# Altium schematic symbol library Ic%.SchLib: 452 symbols (part 11 of 12)
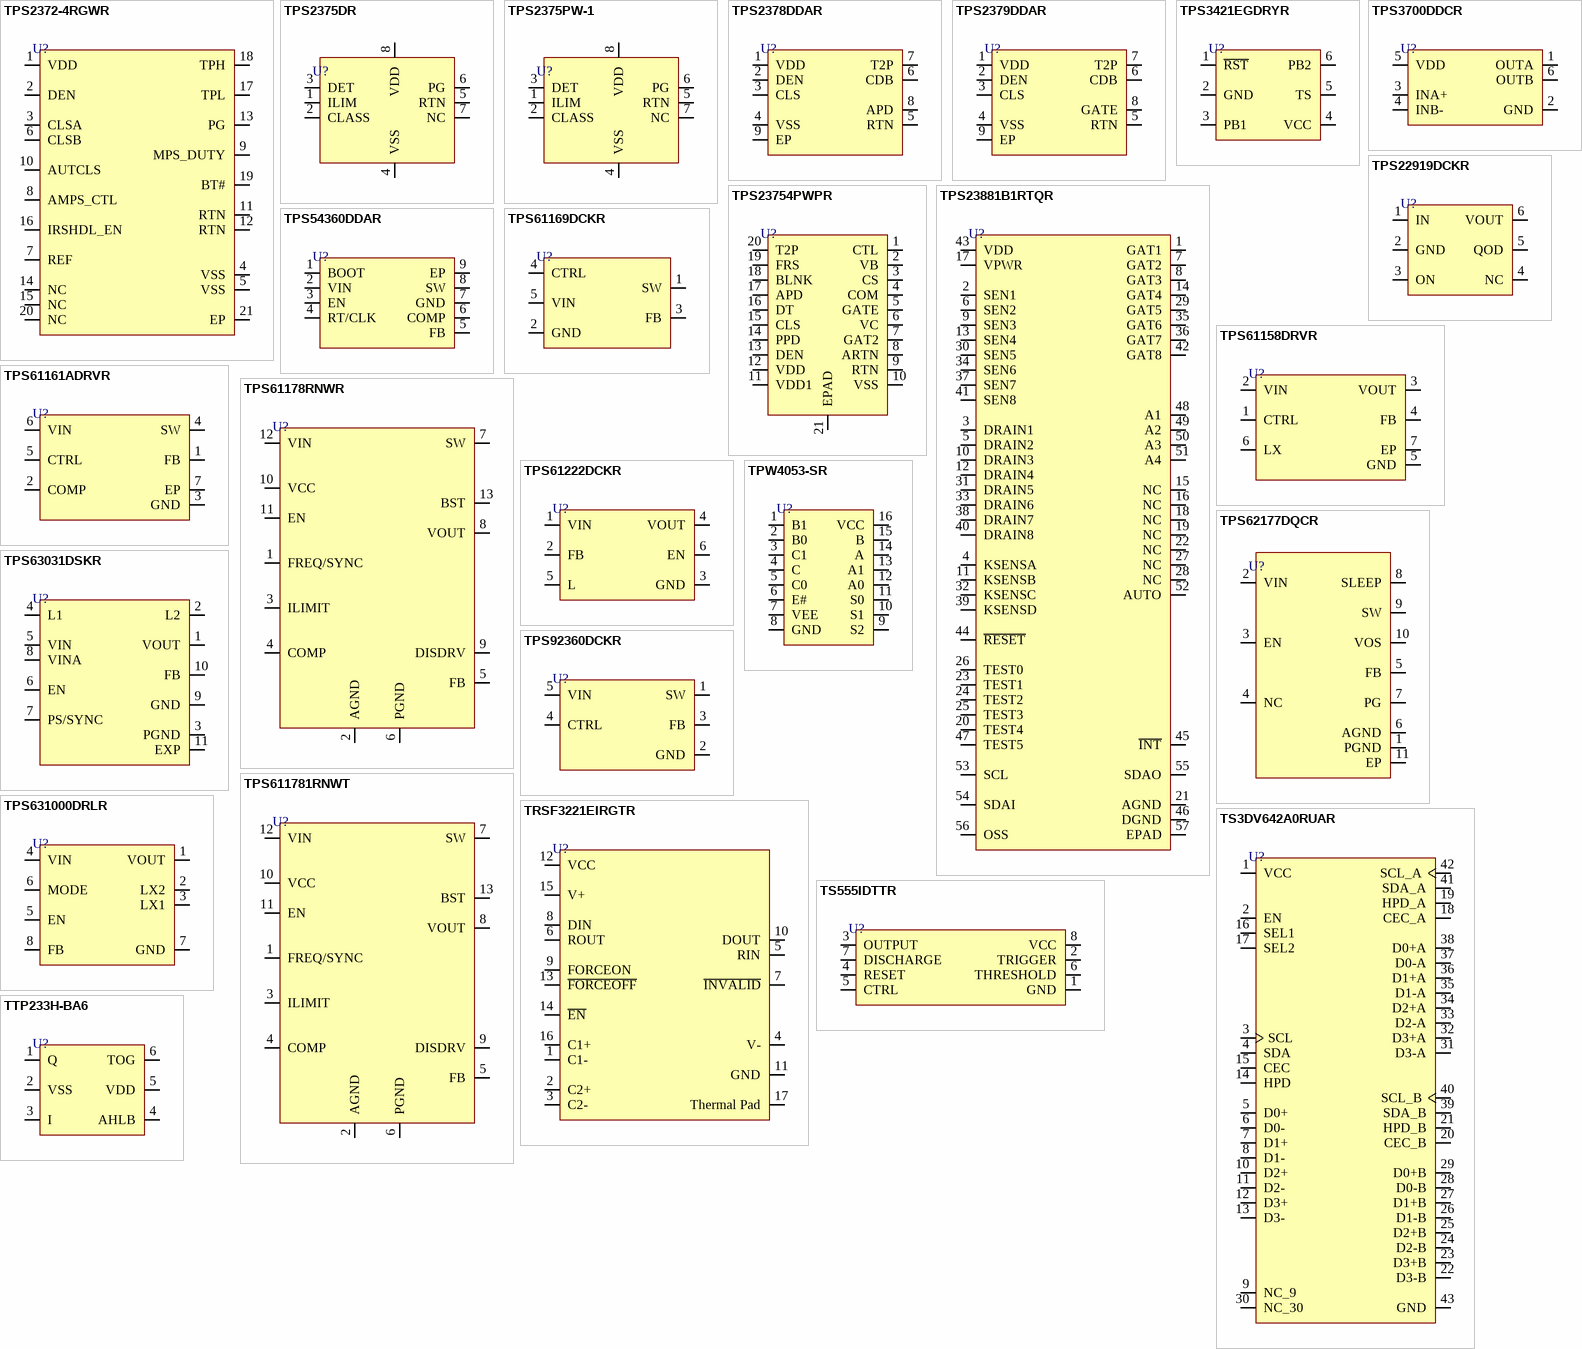
[diagram p33: symbols TPS2372-4RGWR to TTP233H-BA6]

## TPS61178RNWR
designator U?
ICLEDDRVRDCREG13QFN; Manufacturer: Texas Instruments; Manufacturer Part Number: TPS61178RNWR; Item Type: IC; Supplier: Mouser; LCSC Part Number: C127918; RoHS: Yes; Stock: 3098; Pricing: 1=3.28, 10=2.79, 50=2.79, 100=2.37, 1000=2.14, 10000=1.12 (USD); ComponentLink1URL: http://www.ti.com/general/docs/suppproductinfo.tsp?distId=10&amp;gotoUrl=http%3A%2F%2Fwww.ti.com%2Flit%2Fgpn%2Ftps61178&src-supplier=Digikey; ComponentLink1Description: http://www.ti.com/general/docs/suppproductinfo.tsp?distId=10&amp;gotoUrl=http%3A%2F%2Fwww.ti.com%2Flit%2Fgpn%2Ftps61178&src-supplier=Digikey; ComponentLink2URL: http://www.ti.com/lit/ds/symlink/tps61178.pdf?src-supplier=Digikey; ComponentLink2Description: http://www.ti.com/lit/ds/symlink/tps61178.pdf?src-supplier=Digikey
footprint VQFN-13-HR(3x3.5)
pins: 1 FREQ/SYNC, 2 AGND, 3 ILIMIT, 4 COMP, 5 FB, 6 PGND, 7 SW, 8 VOUT, 9 DISDRV, 10 VCC, 11 EN, 12 VIN, 13 BST

## TPS61222DCKR
designator U?
IC REG BOOST 5V 200MA SC70-6; Manufacturer: Texas Instruments; Manufacturer Part Number: TPS61222DCKR; Supplier: Mouser; LCSC Part Number: C116461; RoHS: Yes; Item Type: IC; Stock: 20831; Pricing: 1=1.08, 10=0.78, 50=0.705, 100=0.622, 1000=0.515, 10000=0.476 (USD); ComponentLink1URL: https://datasheet.ciiva.com/2034/tps61220-2034085.pdf?src-supplier=Digikey; ComponentLink1Description: https://datasheet.ciiva.com/2034/tps61220-2034085.pdf?src-supplier=Digikey; ComponentLink2URL: https://datasheet.ciiva.com/14376/tps61222-14376997.pdf?src-supplier=Avnet; ComponentLink2Description: https://datasheet.ciiva.com/14376/tps61222-14376997.pdf?src-supplier=Avnet
footprint SC-70-6
pins: 1 VIN, 2 FB, 3 GND, 4 VOUT, 5 L, 6 EN

## TPS62177DQCR
designator U?
IC REG BUCK 3.3V 500MA 10WSON; Manufacturer: Texas Instruments; Manufacturer Part Number: TPS62177DQCR; Supplier: Mouser; LCSC Part Number: C91241; RoHS: Yes; Item Type: IC; Stock: 441; Pricing: 1=1.38, 10=1.01, 50=0.912, 100=0.808, 1000=0.674, 10000=0.628 (USD); ComponentLink1URL: https://datasheet.ciiva.com/12225/slvsb35-213378-12225446.pdf?src-supplier=Mouser; ComponentLink1Description: https://datasheet.ciiva.com/12225/slvsb35-213378-12225446.pdf?src-supplier=Mouser; ComponentLink2URL: https://datasheet.ciiva.com/15082/tps62177-15082070.pdf?src-supplier=Digikey; ComponentLink2Description: https://datasheet.ciiva.com/15082/tps62177-15082070.pdf?src-supplier=Digikey
footprint 10-WSON (3x2)
pins: 1 PGND, 2 VIN, 3 EN, 4 NC, 5 FB, 6 AGND, 7 PG, 8 SLEEP, 9 SW, 10 VOS, 11 EP

## TPS63031DSKR
designator U?
IC REG BUCK BST 3.3V 900MA 10SON; Manufacturer: Texas Instruments; Manufacturer Part Number: TPS63031DSKR; Supplier: Mouser; LCSC Part Number: C15516; RoHS: Yes; Item Type: IC; Stock: 43441; Pricing: 1=2.33, 10=1.64, 50=1.64, 100=1.35, 1000=0.965, 10000=0.917 (USD); ComponentLink1URL: https://datasheet.ciiva.com/2034/tps63030-2034702.pdf?src-supplier=Digikey; ComponentLink1Description: https://datasheet.ciiva.com/2034/tps63030-2034702.pdf?src-supplier=Digikey; ComponentLink2URL: https://datasheet.ciiva.com/3221/tps63030-3221513.pdf?src-supplier=Avnet; ComponentLink2Description: https://datasheet.ciiva.com/3221/tps63030-3221513.pdf?src-supplier=Avnet
footprint 10-SON (2.5x2.5)
pins: 1 VOUT, 2 L2, 3 PGND, 4 L1, 5 VIN, 6 EN, 7 PS/SYNC, 8 VINA, 9 GND, 10 FB, 11 EXP

## TPS92360DCKR
designator U?
IC LED DRV RGLTR PWM 1.2A SC70-5; Manufacturer: Texas Instruments; Manufacturer Part Number: TPS92360DCKR; Supplier: Digikey; LCSC Part Number: C2928788; RoHS: No; Item Type: IC; Stock: 4572; Pricing: 1=0.91, 10=0.817, 25=0.7748, 100=0.6366, 250=0.59508, 500=0.52588, 1000=0.41517 (USD)
footprint SC70-5
pins: 1 SW, 2 GND, 3 FB, 4 CTRL, 5 VIN

## TPS611781RNWT
designator U?
20-V, 10-A fully integrated sync boost with load disconnect 13-VQFN-HR -40 to 85; Manufacturer: Texas Instruments; Manufacturer Part Number: TPS611781RNWT; Supplier: Digikey; Supplier Part Number: 296-46568-1-ND; RoHS: Yes; Category: Voltage Regulators - Switching; Stock: 351; Pricing: 1=5.66, 10=5.084, 25=4.8064, 100=4.1655 (USD); ComponentLink1URL: http://www.ti.com/lit/ds/symlink/tps61178.pdf?src-supplier=Digikey; ComponentLink1Description: http://www.ti.com/lit/ds/symlink/tps61178.pdf?src-supplier=Digikey
footprint VQFN-13-HR(3x3.5)
pins: 1 FREQ/SYNC, 2 AGND, 3 ILIMIT, 4 COMP, 5 FB, 6 PGND, 7 SW, 8 VOUT, 9 DISDRV, 10 VCC, 11 EN, 12 VIN, 13 BST

## TPS631000DRLR
designator U?
Non-Isolated PoL Module DC DC Converter 1 Output 1.2 ~ 5.3V 2A 1.6V - 5.5V Input; Manufacturer: Texas Instruments; Manufacturer Part Number: TPS631000DRLR; Item Type: IC; Topology: 6153TopologyType; Supplier: Mouser; LCSC Part Number: C5219190; RoHS: No; Stock: 19488; Pricing: 1=1.49, 10=1.34, 50=1.34, 100=1.08, 1000=0.733, 10000=0.631 (USD); Pins: 8NUMBER; Length: 2.1mm; Width: 1.2mm; Height: 600um; Thickness: 550um
footprint SOT-583
pins: 1 VOUT, 2 LX2, 3 LX1, 4 VIN, 5 EN, 6 MODE, 7 GND, 8 FB

## TPW4053-SR
designator U?
ANALOG SWITCH 3X SPDT (SINGLEPOL; Manufacturer: 3PEAK; Manufacturer Part Number: TPW4053-SR; Item Type: IC; Supplier: DigiKey; LCSC Part Number: C7500846; RoHS: No; Stock: 2500
footprint SOIC-16
pins: 1 B1, 2 B0, 3 C1, 4 C, 5 C0, 6 E#, 7 VEE, 8 GND, 9 S2, 10 S1, 11 S0, 12 A0, 13 A1, 14 A, 15 B, 16 VCC

## TRSF3221EIRGTR
designator U?
IC TRANSCEIVER FULL 1/1 16VQFN; Manufacturer: Texas Instruments; Manufacturer Part Number: TRSF3221EIRGTR; Supplier: Mouser; LCSC Part Number: C2861230; RoHS: No; Item Type: IC; Stock: 8746; Pricing: 1=2.41, 10=1.64, 50=1.64, 100=1.47, 1000=1.3, 10000=1.24 (USD)
footprint 16-QFN (3x3).
pins: 1 C1-, 2 C2+, 3 C2-, 4 V-, 5 RIN, 6 ROUT, 7 ~{INVALID}, 8 DIN, 9 FORCEON, 10 DOUT, 11 GND, 12 VCC, 13 ~{FORCEOFF}, 14 ~{EN}, 15 V+, 16 C1+, 17 Thermal Pad

## TS3DV642A0RUAR
designator U?
IC MUX/DEMUX 12 X 2:1 42WQFN; Manufacturer: Texas Instruments; Manufacturer Part Number: TS3DV642A0RUAR; Value: 10.5R; Supplier: Mouser; LCSC Part Number: C157482; RoHS: Yes; Item Type: IC; Stock: 15823; Pricing: 1=1.57, 10=1.41, 50=1.41, 100=1.13, 1000=0.773, 10000=0.666 (USD); Length: 9mm; Width: 3.5mm; Height: 800um; Thickness: 750um; ComponentLink1URL: https://datasheet.ciiva.com/30004/ts3dv642-30004934.pdf?src-supplier=Avnet; ComponentLink1Description: https://datasheet.ciiva.com/30004/ts3dv642-30004934.pdf?src-supplier=Avnet; ComponentLink2URL: https://datasheet.ciiva.com/18576/ts3dv642-18576654.pdf?src-supplier=Digikey; ComponentLink2Description: https://datasheet.ciiva.com/18576/ts3dv642-18576654.pdf?src-supplier=Digikey
footprint 42-WQFN (3.5x9)
pins: 1 VCC, 2 EN, 3 SCL, 4 SDA, 5 D0+, 6 D0-, 7 D1+, 8 D1-, 9 NC_9, 10 D2+, 11 D2-, 12 D3+, 13 D3-, 14 HPD, 15 CEC, 16 SEL1, 17 SEL2, 18 CEC_A, 19 HPD_A, 20 CEC_B, 21 HPD_B, 22 D3-B, 23 D3+B, 24 D2-B, 25 D2+B, 26 D1-B, 27 D1+B, 28 D0-B, 29 D0+B, 30 NC_30, 31 D3-A, 32 D3+A, 33 D2-A, 34 D2+A, 35 D1-A, 36 D1+A, 37 D0-A, 38 D0+A, 39 SDA_B, 40 SCL_B, 41 SDA_A, 42 SCL_A, 43 GND

## TS555IDTTR
designator U?
IC OSC SINGLE TIMER 2.7MHZ 8SOIC; Manufacturer: STMicroelectronics; Manufacturer Part Number: TS555IDTTR; Max Supply Voltage: 16V; Min Supply Voltage: 2V; Number of Channels: 1NUMBER; Propagation Delay: 100ns; Supplier: Future Electronics; LCSC Part Number: C880084; RoHS: Yes; Item Type: IC; Stock: 50000; Pricing: 2500=0.36, 5000=0.355, 7500=0.35, 12500=0.345, 25000=0.335 (USD); Height: 1.75mm; ComponentLink1URL: http://www.farnell.com/datasheets/1947266.pdf?src-supplier=Farnell; ComponentLink1Description: http://www.farnell.com/datasheets/1947266.pdf?src-supplier=Farnell; ComponentLink2URL: http://www.farnell.com/datasheets/1947266.pdf?src-supplier=Element14; ComponentLink2Description: http://www.farnell.com/datasheets/1947266.pdf?src-supplier=Element14; ComponentLink3URL: http://www.farnell.com/datasheets/1947266.pdf?src-supplier=Newark; ComponentLink3Description: http://www.farnell.com/datasheets/1947266.pdf?src-supplier=Newark; ComponentLink4URL: http://www.st.com/content/ccc/resource/technical/document/datasheet/45/d5/c6/11/46/d3/4b/a3/CD00000893.pdf/files/CD00000893.pdf/jcr:content/translations/en.CD00000893.pdf?src-supplier=Digikey; ComponentLink4Description: http://www.st.com/content/ccc/resource/technical/document/datasheet/45/d5/c6/11/46/d3/4b/a3/CD00000893.pdf/files/CD00000893.pdf/jcr:content/translations/en.CD00000893.pdf?src-supplier=Digikey; ComponentLink5URL: http://www.st.com/st-web-ui/static/active/en/resource/technical/document/datasheet/CD00000893.pdf?src-supplier=Avnet; ComponentLink5Description: http://www.st.com/st-web-ui/static/active/en/resource/technical/document/datasheet/CD00000893.pdf?src-supplier=Avnet; ComponentLink6URL: https://datasheet.octopart.com/TS555IDTTR-STMicroelectronics-datasheet-45197658.pdf?src-supplier=TME; ComponentLink6Description: https://datasheet.octopart.com/TS555IDTTR-STMicroelectronics-datasheet-45197658.pdf?src-supplier=TME
footprint SOIC-8(0.154", 3.90mm Width)
pins: 1 GND, 2 TRIGGER, 3 OUTPUT, 4 RESET, 5 CTRL, 6 THRESHOLD, 7 DISCHARGE, 8 VCC

## TTP233H-BA6
designator U?
SOT-23-6L Touch Sensors ROHS; Manufacturer: Tontek Design Tech; Manufacturer Part Number: TTP233H-BA6; Item Type: IC; Package: SOT-23-6L; LCSC Part Number: C2890349; ComponentLink1Description: LCSC; ComponentLink1URL: https://www.lcsc.com/product-detail/Touch-Sensors_Tontek-Design-Tech-TTP233H-BA6_C2890349.html
footprint SOT-23-6
pins: 1 Q, 2 VSS, 3 I, 4 AHLB, 5 VDD, 6 TOG

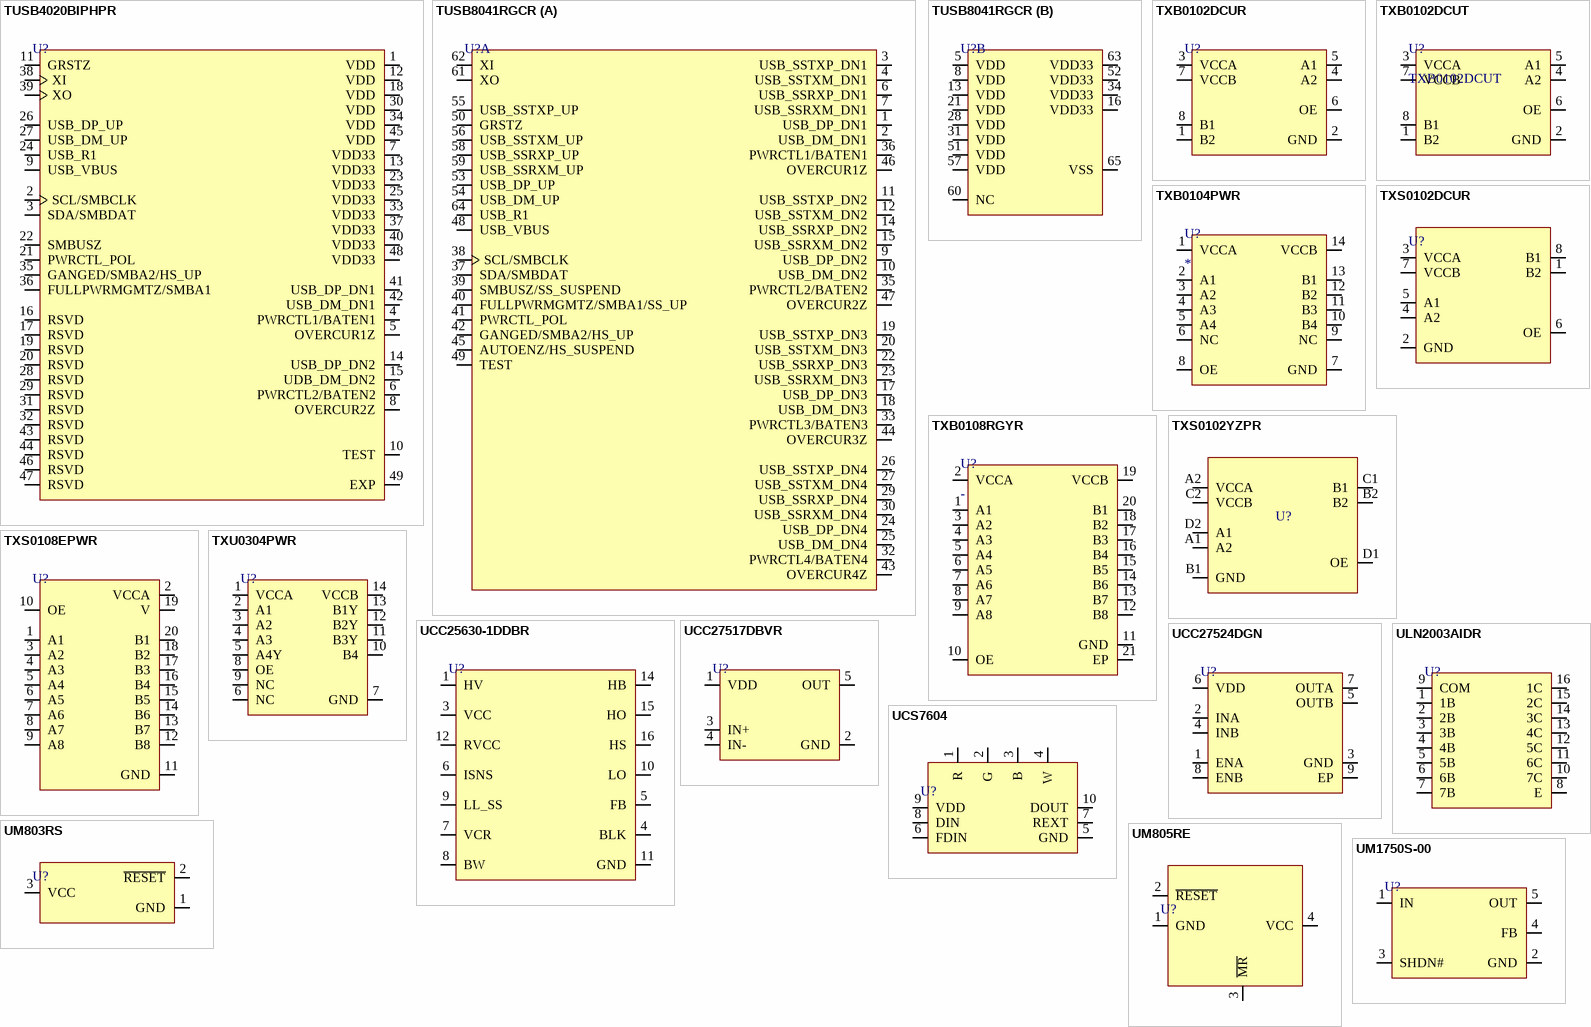
[diagram p21: symbols TUSB4020BIPHPR to UM1750S-00]

## TUSB4020BIPHPR
designator U?
IC USB 2.0 2PORT HUB IND 48HTQFP; Manufacturer: Texas Instruments; Manufacturer Part Number: TUSB4020BIPHPR; Supplier: Mouser; LCSC Part Number: C2864320; RoHS: Yes; Item Type: IC; Stock: 2703; Pricing: 1=4.5, 10=3.15, 50=3.15, 100=2.85, 1000=2.55, 10000=2.52 (USD); ComponentLink1URL: http://www.ti.com/lit/ds/symlink/tusb4020bi.pdf?src-supplier=Digikey; ComponentLink1Description: http://www.ti.com/lit/ds/symlink/tusb4020bi.pdf?src-supplier=Digikey; ComponentLink2URL: http://www.ti.com/general/docs/suppproductinfo.tsp?distId=10&amp;gotoUrl=http%3A%2F%2Fwww.ti.com%2Flit%2Fgpn%2Ftusb4020bi&src-supplier=Digikey; ComponentLink2Description: http://www.ti.com/general/docs/suppproductinfo.tsp?distId=10&amp;gotoUrl=http%3A%2F%2Fwww.ti.com%2Flit%2Fgpn%2Ftusb4020bi&src-supplier=Digikey
footprint 48-HTQFP (7x7)
pins: 1 VDD, 2 SCL/SMBCLK, 3 SDA/SMBDAT, 4 PWRCTL1/BATEN1, 5 OVERCUR1Z, 6 PWRCTL2/BATEN2, 7 VDD33, 8 OVERCUR2Z, 9 USB_VBUS, 10 TEST, 11 GRSTZ, 12 VDD, 13 VDD33, 14 USB_DP_DN2, 15 UDB_DM_DN2, 16 RSVD, 17 RSVD, 18 VDD, 19 RSVD, 20 RSVD, 21 PWRCTL_POL, 22 SMBUSZ, 23 VDD33, 24 USB_R1, 25 VDD33, 26 USB_DP_UP, 27 USB_DM_UP, 28 RSVD, 29 RSVD, 30 VDD, 31 RSVD, 32 RSVD, 33 VDD33, 34 VDD, 35 GANGED/SMBA2/HS_UP, 36 FULLPWRMGMTZ/SMBA1, 37 VDD33, 38 XI, 39 XO, 40 VDD33, 41 USB_DP_DN1, 42 USB_DM_DN1, 43 RSVD, 44 RSVD, 45 VDD, 46 RSVD, 47 RSVD, 48 VDD33, 49 EXP

## TUSB8041RGCR
designator U?
IC HUB CONTROLLER USB 64VQFN; Manufacturer: Texas Instruments; Manufacturer Part Number: TUSB8041RGCR; Supplier: Mouser; LCSC Part Number: C486066; RoHS: Yes; Item Type: IC; Stock: 5065; Pricing: 1=6.99, 10=6.39, 50=6.12, 100=5.43, 1000=4.5, 10000=4.34 (USD); Length: 9mm; Width: 9mm; Height: 1mm; Thickness: 880um; ComponentLink1URL: http://www.ti.com/general/docs/suppproductinfo.tsp?distId=10&amp;gotoUrl=http%3A%2F%2Fwww.ti.com%2Flit%2Fgpn%2Ftusb8041&src-supplier=Digikey; ComponentLink1Description: http://www.ti.com/general/docs/suppproductinfo.tsp?distId=10&amp;gotoUrl=http%3A%2F%2Fwww.ti.com%2Flit%2Fgpn%2Ftusb8041&src-supplier=Digikey; ComponentLink2URL: http://www.ti.com/lit/ds/symlink/tusb8041.pdf?src-supplier=Digikey; ComponentLink2Description: http://www.ti.com/lit/ds/symlink/tusb8041.pdf?src-supplier=Digikey; ComponentLink3URL: http://www.ti.com/lit/gpn/tusb8041?src-supplier=Mouser; ComponentLink3Description: http://www.ti.com/lit/gpn/tusb8041?src-supplier=Mouser; ComponentLink4URL: http://www.ti.com/general/docs/lit/getliterature.tsp?genericPartNumber=TUSB8041&&fileType=pdf&src-supplier=Avnet; ComponentLink4Description: http://www.ti.com/general/docs/lit/getliterature.tsp?genericPartNumber=TUSB8041&&fileType=pdf&src-supplier=Avnet
footprint 64-VQFN (9x9)
part A pins: 1 USB_DP_DN1, 2 USB_DM_DN1, 3 USB_SSTXP_DN1, 4 USB_SSTXM_DN1, 6 USB_SSRXP_DN1, 7 USB_SSRXM_DN1, 9 USB_DP_DN2, 10 USB_DM_DN2, 11 USB_SSTXP_DN2, 12 USB_SSTXM_DN2, 14 USB_SSRXP_DN2, 15 USB_SSRXM_DN2, 17 USB_DP_DN3, 18 USB_DM_DN3, 19 USB_SSTXP_DN3, 20 USB_SSTXM_DN3, 22 USB_SSRXP_DN3, 23 USB_SSRXM_DN3, 24 USB_DP_DN4, 25 USB_DM_DN4, 26 USB_SSTXP_DN4, 27 USB_SSTXM_DN4, 29 USB_SSRXP_DN4, 30 USB_SSRXM_DN4, 32 PWRCTL4/BATEN4, 33 PWRCTL3/BATEN3, 35 PWRCTL2/BATEN2, 36 PWRCTL1/BATEN1, 37 SDA/SMBDAT, 38 SCL/SMBCLK, 39 SMBUSZ/SS_SUSPEND, 40 FULLPWRMGMTZ/SMBA1/SS_UP, 41 PWRCTL_POL, 42 GANGED/SMBA2/HS_UP, 43 OVERCUR4Z, 44 OVERCUR3Z, 45 AUTOENZ/HS_SUSPEND, 46 OVERCUR1Z, 47 OVERCUR2Z, 48 USB_VBUS, 49 TEST, 50 GRSTZ, 53 USB_DP_UP, 54 USB_DM_UP, 55 USB_SSTXP_UP, 56 USB_SSTXM_UP, 58 USB_SSRXP_UP, 59 USB_SSRXM_UP, 61 XO, 62 XI, 64 USB_R1
part B pins: 5 VDD, 8 VDD, 13 VDD, 16 VDD33, 21 VDD, 28 VDD, 31 VDD, 34 VDD33, 51 VDD, 52 VDD33, 57 VDD, 60 NC, 63 VDD33, 65 VSS

## TXB0102DCUR
designator U?
IC TRANSLTR BIDIRECTIONAL 8VSSOP; Manufacturer: Texas Instruments; Manufacturer Part Number: TXB0102DCUR; Number of Circuits: 1; Nominal Supply Current: 3.5uA; Number of Inputs: 1NUMBER; Max Supply Voltage: 5.5V; Min Supply Voltage: 1.2V; Propagation Delay: 7.4ns; Data Rate: 100Mbps; Logic Function: Translator; Number of Bits: 2; Turn-On Delay Time: 31ns; High Level Output Current: -20uA; Low Level Output Current: 20uA; Output Type: 3-STATE; Supplier: Digikey; Supplier Part Number: 296-22862-1-ND; RoHS: Yes; Category: Voltage Level Shifters; Stock: 10593; Pricing: 1=0.69, 10=0.606, 25=0.5696, 100=0.4649, 250=0.4318, 500=0.36748, 1000=0.29398 (USD); Mounting Technology: Surface Mount; Case/Package: VSSOP; Pins: 8; Weight: 0.000339oz; Min Operating Temperature: -40°C; Max Operating Temperature: 85°C; Number of Outputs: 1NUMBER; Packaging: Tape and Reel; Package Quantity: 3000; Series: -; Channel Type: Bidirectional; Length: 2.3mm; Width: 2mm; Height: 900um; Thickness: 850um; Radiation Hardening: No; Reach SVHC Compliant: No; Lead Free: Lead Free; RoHS Compliant: Yes; ComponentLink1URL: https://datasheet.ciiva.com/7744/1634161-7744195.pdf?src-supplier=Element14; ComponentLink1Description: https://datasheet.ciiva.com/7744/1634161-7744195.pdf?src-supplier=Element14; ComponentLink2URL: https://datasheet.ciiva.com/22677/1699360-22677930.pdf?src-supplier=Element14; ComponentLink2Description: https://datasheet.ciiva.com/22677/1699360-22677930.pdf?src-supplier=Element14; ComponentLink3URL: https://datasheet.ciiva.com/4226/sces641b-4226960.pdf?src-supplier=Arrow+Electronics; ComponentLink3Description: https://datasheet.ciiva.com/4226/sces641b-4226960.pdf?src-supplier=Arrow+Electronics; ComponentLink4URL: https://datasheet.ciiva.com/15096/getdatasheetpartid-214907-15096235.pdf?src-supplier=Verical; ComponentLink4Description: https://datasheet.ciiva.com/15096/getdatasheetpartid-214907-15096235.pdf?src-supplier=Verical; ComponentLink5URL: https://datasheet.ciiva.com/6132/txb0102-6132717.pdf?src-supplier=Farnell; ComponentLink5Description: https://datasheet.ciiva.com/6132/txb0102-6132717.pdf?src-supplier=Farnell; ComponentLink6URL: https://datasheet.ciiva.com/46384/1874809-46384198.pdf?src-supplier=Element14; ComponentLink6Description: https://datasheet.ciiva.com/46384/1874809-46384198.pdf?src-supplier=Element14; ComponentLink7URL: https://datasheet.ciiva.com/1899/txb0102-1899430.pdf?src-supplier=Digikey; ComponentLink7Description: https://datasheet.ciiva.com/1899/txb0102-1899430.pdf?src-supplier=Digikey; ComponentLink8URL: https://datasheet.ciiva.com/1899/txb0102-1899429.pdf?src-supplier=Digikey; ComponentLink8Description: https://datasheet.ciiva.com/1899/txb0102-1899429.pdf?src-supplier=Digikey; ComponentLink9URL: https://datasheet.ciiva.com/1899/txb0102-1899431.pdf?src-supplier=Digikey; ComponentLink9Description: https://datasheet.ciiva.com/1899/txb0102-1899431.pdf?src-supplier=Digikey; ComponentLink10URL: https://datasheet.ciiva.com/14287/txb0102-14287496.pdf?src-supplier=Avnet; ComponentLink10Description: https://datasheet.ciiva.com/14287/txb0102-14287496.pdf?src-supplier=Avnet; LCSC Part Number: C60709; Type: IC; ComponentLink11Description: LCSC; ComponentLink11URL: https://www.lcsc.com/product-detail/Translators-Level-Shifters_Texas-Instruments-TXB0102DCUR_C60709.html
footprint VSSOP-8 (0.5mm Pitch) (3.1x2.1)
pins: 1 B2, 2 GND, 3 VCCA, 4 A2, 5 A1, 6 OE, 7 VCCB, 8 B1

## TXB0102DCUT
designator U?
IC TRNSLTR BIDIRECTIONAL US8; Manufacturer: Texas Instruments; Propagation Delay: 31ns; Min Supply Voltage: 1.65V; Max Supply Voltage: 5.5V; Data Rate: 100Mbps; Number of Channels: 2; Logic Function: Translator; Turn-On Delay Time: 7.4ns; High Level Output Current: -20uA; Low Level Output Current: 20uA; Output Type: 3-STATE; Output Current: 50mA; Supplier 1: Arrow Electronics; Manufacturer Part Number: TXB0102DCUT; RoHS: Yes; Category: Integrated Circuits (ICs); Stock 1: 10; Pricing 1: 1=0.79330, 10=0.66470, 25=0.65820, 250=0.37450, 500=0.36200, 1000=0.29770, 2500=0.28440 (USD); Mount: Surface Mount; Case/Package: VSSOP; Number of Pins: 8; Weight: 0.000339oz; Contact Plating: Gold; Min Operating Temperature: -40°C; Max Operating Temperature: 85°C; Packaging: Tape and Reel; Package Quantity: 1; Number of Bits: 2; Series: -; Number of Inputs: 2; Length: 2.3mm; Width: 2mm; Height: 0.85mm; Radiation Hardening: No; Lead Free: Lead Free; RoHS Compliant: Yes; REACH SVHC: No SVHC; ComponentLink1URL: https://datasheet.ciiva.com/4226/sces641b-4226901.pdf?src-supplier=Arrow+Electronics; ComponentLink1Description: https://datasheet.ciiva.com/4226/sces641b-4226901.pdf?src-supplier=Arrow+Electronics; ComponentLink2URL: https://datasheet.ciiva.com/15096/getdatasheetpartid-226009-15096242.pdf?src-supplier=Verical; ComponentLink2Description: https://datasheet.ciiva.com/15096/getdatasheetpartid-226009-15096242.pdf?src-supplier=Verical; ComponentLink3URL: https://datasheet.ciiva.com/14287/txb0102-14287498.pdf?src-supplier=Avnet; ComponentLink3Description: https://datasheet.ciiva.com/14287/txb0102-14287498.pdf?src-supplier=Avnet; ComponentLink4URL: https://datasheet.ciiva.com/14287/txb0102-14287370.pdf?src-supplier=Avnet; ComponentLink4Description: https://datasheet.ciiva.com/14287/txb0102-14287370.pdf?src-supplier=Avnet; ComponentLink5URL: https://datasheet.ciiva.com/6619/txb0102-6619255.pdf?src-supplier=Digi-Key; ComponentLink5Description: https://datasheet.ciiva.com/6619/txb0102-6619255.pdf?src-supplier=Digi-Key; ComponentLink6URL: https://datasheet.ciiva.com/6619/txb0102-6619256.pdf?src-supplier=Digi-Key; ComponentLink6Description: https://datasheet.ciiva.com/6619/txb0102-6619256.pdf?src-supplier=Digi-Key; ComponentLink7URL: https://datasheet.ciiva.com/6619/txb0102-6619257.pdf?src-supplier=Digi-Key; ComponentLink7Description: https://datasheet.ciiva.com/6619/txb0102-6619257.pdf?src-supplier=Digi-Key; Supplier Part Number 1: TXB0102DCUT
footprint TXB0102DCUT
pins: 1 B2, 2 GND, 3 VCCA, 4 A2, 5 A1, 6 OE, 7 VCCB, 8 B1

## TXB0104PWR
designator U?
4-Bit Bidirectional Voltage-Level Shifter with Auto Direction Sensing and +/-15 kV ESD Protect 14-TSSOP -40 to 85; Manufacturer: Texas Instruments; Manufacturer Part Number: TXB0104PWR; Number of Outputs: 4NUMBER; Min Supply Voltage (DC): 1.2V; Item Type: IC; Supplier: Digikey; Supplier Part Number: 296-21929-1-ND; RoHS: Yes; Category: Voltage Level Shifters; Stock: 5613; Pricing: 1=0.98, 10=0.878, 25=0.8336, 100=0.6848, 250=0.64012, 500=0.56568, 1000=0.44659 (USD); Thickness: 1mm; ComponentLink1URL: https://datasheet.ciiva.com/15096/getdatasheetpartid-48026-15096134.pdf?src-supplier=Verical; ComponentLink1Description: https://datasheet.ciiva.com/15096/getdatasheetpartid-48026-15096134.pdf?src-supplier=Verical; ComponentLink2URL: https://datasheet.ciiva.com/22653/1845221-22653354.pdf?src-supplier=Farnell; ComponentLink2Description: https://datasheet.ciiva.com/22653/1845221-22653354.pdf?src-supplier=Farnell; ComponentLink3URL: https://datasheet.ciiva.com/1508/1633692-1508723.pdf?src-supplier=Element14; ComponentLink3Description: https://datasheet.ciiva.com/1508/1633692-1508723.pdf?src-supplier=Element14; ComponentLink4URL: https://datasheet.ciiva.com/1899/txb0104-1899514.pdf?src-supplier=Digikey; ComponentLink4Description: https://datasheet.ciiva.com/1899/txb0104-1899514.pdf?src-supplier=Digikey; ComponentLink5URL: https://datasheet.ciiva.com/1899/txb0104-1899515.pdf?src-supplier=Digikey; ComponentLink5Description: https://datasheet.ciiva.com/1899/txb0104-1899515.pdf?src-supplier=Digikey; ComponentLink6URL: https://datasheet.ciiva.com/1899/txb0104-1899516.pdf?src-supplier=Digikey; ComponentLink6Description: https://datasheet.ciiva.com/1899/txb0104-1899516.pdf?src-supplier=Digikey; ComponentLink7URL: https://datasheet.ciiva.com/14287/txb0104-14287375.pdf?src-supplier=Avnet; ComponentLink7Description: https://datasheet.ciiva.com/14287/txb0104-14287375.pdf?src-supplier=Avnet; ComponentLink8URL: https://datasheet.ciiva.com/46395/1864432-46395886.pdf?src-supplier=Element14; ComponentLink8Description: https://datasheet.ciiva.com/46395/1864432-46395886.pdf?src-supplier=Element14; ComponentLink9URL: https://datasheet.ciiva.com/1508/1849862-1508724.pdf?src-supplier=Element14; ComponentLink9Description: https://datasheet.ciiva.com/1508/1849862-1508724.pdf?src-supplier=Element14; Package: 14-TSSOP; LCSC Part Number: C60708
footprint 14-TSSOP
pins: 1 VCCA, 2 A1, 3 A2, 4 A3, 5 A4, 6 NC, 7 GND, 8 OE, 9 NC, 10 B4, 11 B3, 12 B2, 13 B1, 14 VCCB

## TXB0108RGYR
designator U?, comment -
IC 8-BIT TRNSLTR 15KV ESD 20VQFN; Manufacturer: Texas Instruments; Manufacturer Part Number: TXB0108RGYR; Supplier: Digikey; Supplier Part Number: 296-21528-1-ND; RoHS: Yes; Category: Voltage Level Shifters; Stock: 3013; Pricing: 1=1.55, 10=1.394, 25=1.3156, 100=1.1208, 250=1.0524, 500=0.92086, 1000=0.763 (USD); ComponentLink1URL: https://datasheet.ciiva.com/15096/getdatasheetpartid-172984-15096214.pdf?src-supplier=Verical; ComponentLink1Description: https://datasheet.ciiva.com/15096/getdatasheetpartid-172984-15096214.pdf?src-supplier=Verical; ComponentLink2URL: https://datasheet.ciiva.com/1899/txb0108-1899601.pdf?src-supplier=Digikey; ComponentLink2Description: https://datasheet.ciiva.com/1899/txb0108-1899601.pdf?src-supplier=Digikey; ComponentLink3URL: https://datasheet.ciiva.com/1899/txb0108-1899602.pdf?src-supplier=Digikey; ComponentLink3Description: https://datasheet.ciiva.com/1899/txb0108-1899602.pdf?src-supplier=Digikey; ComponentLink4URL: https://datasheet.ciiva.com/1899/txb0108-1899603.pdf?src-supplier=Digikey; ComponentLink4Description: https://datasheet.ciiva.com/1899/txb0108-1899603.pdf?src-supplier=Digikey; ComponentLink5URL: https://datasheet.ciiva.com/1508/1811182-1508728.pdf?src-supplier=Element14; ComponentLink5Description: https://datasheet.ciiva.com/1508/1811182-1508728.pdf?src-supplier=Element14
footprint 20-VFQFN Exposed Pad
pins: 1 A1, 2 VCCA, 3 A2, 4 A3, 5 A4, 6 A5, 7 A6, 8 A7, 9 A8, 10 OE, 11 GND, 12 B8, 13 B7, 14 B6, 15 B5, 16 B4, 17 B3, 18 B2, 19 VCCB, 20 B1, 21 EP

## TXS0102DCUR
designator U?
IC TRANSLTR BIDIRECTIONAL 8VSSOP; Manufacturer: Texas Instruments; Manufacturer Part Number: TXS0102DCUR; Number of Outputs: 2NUMBER; Number of Inputs: 2; Nominal Supply Current: 14.4uA; Output Current: 1A; Min Supply Voltage: 1.65V; Max Supply Voltage: 5.5V; Data Rate: 24Mbps; Propagation Delay: 4.6ns; Logic Function: Translator; Turn-On Delay Time: 260ns; High Level Output Current: -20uA; Low Level Output Current: 1mA; Number of Circuits: 1; Supplier: Mouser; Supplier Part Number: 595-TXS0102DCUR; RoHS: Yes; Category: Voltage Level Shifters; Stock: 149802; Pricing: 1=0.89, 10=0.739, 50=0.739, 100=0.561, 1000=0.383, 10000=0.313 (USD); Case/Package: VSSOP; Pins: 8; Weight: 0.000339oz; Min Operating Temperature: -40°C; Max Operating Temperature: 85°C; Package Quantity: 3000; Number of Channels: 2; Packaging: Tape and Reel; Number of Bits: 2; Quiescent Current: 14.4uA; Series: -; Channel Type: Bidirectional; Length: 2.3mm; Width: 2mm; Height: 900um; Thickness: 850um; Radiation Hardening: No; Reach SVHC Compliant: No; Lead Free: Lead Free; RoHS Compliant: Yes; ComponentLink1URL: https://datasheet.ciiva.com/22653/1846850-22653373.pdf?src-supplier=Farnell; ComponentLink1Description: https://datasheet.ciiva.com/22653/1846850-22653373.pdf?src-supplier=Farnell; ComponentLink2URL: https://datasheet.ciiva.com/15096/getdatasheetpartid-118249-15096172.pdf?src-supplier=Verical; ComponentLink2Description: https://datasheet.ciiva.com/15096/getdatasheetpartid-118249-15096172.pdf?src-supplier=Verical; ComponentLink3URL: https://datasheet.ciiva.com/1508/1857232-1508821.pdf?src-supplier=Element14; ComponentLink3Description: https://datasheet.ciiva.com/1508/1857232-1508821.pdf?src-supplier=Element14; ComponentLink4URL: https://datasheet.ciiva.com/28499/1863639-28499676.pdf?src-supplier=Element14; ComponentLink4Description: https://datasheet.ciiva.com/28499/1863639-28499676.pdf?src-supplier=Element14; ComponentLink5URL: https://datasheet.ciiva.com/46395/1863639-46395871.pdf?src-supplier=Element14; ComponentLink5Description: https://datasheet.ciiva.com/46395/1863639-46395871.pdf?src-supplier=Element14; ComponentLink6URL: https://datasheet.ciiva.com/1899/txs0102-1899369.pdf?src-supplier=Digikey; ComponentLink6Description: https://datasheet.ciiva.com/1899/txs0102-1899369.pdf?src-supplier=Digikey; ComponentLink7URL: https://datasheet.ciiva.com/1899/txs0102-1899368.pdf?src-supplier=Digikey; ComponentLink7Description: https://datasheet.ciiva.com/1899/txs0102-1899368.pdf?src-supplier=Digikey; ComponentLink8URL: https://datasheet.ciiva.com/1899/txs0102-1899370.pdf?src-supplier=Digikey; ComponentLink8Description: https://datasheet.ciiva.com/1899/txs0102-1899370.pdf?src-supplier=Digikey; ComponentLink9URL: https://datasheet.ciiva.com/14287/txs0102-14287516.pdf?src-supplier=Avnet; ComponentLink9Description: https://datasheet.ciiva.com/14287/txs0102-14287516.pdf?src-supplier=Avnet; ComponentLink10URL: https://datasheet.ciiva.com/14287/txs0102-14287518.pdf?src-supplier=Avnet; ComponentLink10Description: https://datasheet.ciiva.com/14287/txs0102-14287518.pdf?src-supplier=Avnet; LCSC Part Number: C53434; Item Type: IC
footprint VSSOP-8 (0.5mm Pitch) (3.1x2.1)
pins: 1 B2, 2 GND, 3 VCCA, 4 A2, 5 A1, 6 OE, 7 VCCB, 8 B1

## TXS0102YZPR
designator U?
IC TRANSLTR BIDIRECTIONAL 8DSBGA; Manufacturer: Texas Instruments; Manufacturer Part Number: TXS0102YZPR; Number of Inputs: 2; Propagation Delay: 260ns; Min Supply Voltage: 1.65V; Max Supply Voltage: 5.5V; Data Rate: 24Mbps; Logic Function: Translator; High Level Output Current: -20uA; Low Level Output Current: 1mA; Turn-On Delay Time: 102ns; Quiescent Current: 14.4uA; Number of Circuits: 1; Rise Time: 165ns; Supplier: Mouser; Supplier Part Number: 595-TXS0102YZPR; RoHS: Yes; Category: Logic ICs; Stock: 48429; Pricing: 1=0.7, 10=0.61, 50=0.61, 100=0.507, 1000=0.402, 10000=0.362 (USD); Mounting Technology: Surface Mount; Case/Package: BGA; Pins: 8; Weight: 8.1E-05oz; Min Operating Temperature: -40°C; Max Operating Temperature: 85°C; Packaging: Tape and Reel; Number of Bits: 2; Series: -; Channel Type: Bidirectional; Output Current: 1mA; Package Quantity: 3000; Length: 1.92mm; Width: 0.918mm; Height: 0.31mm; Radiation Hardening: No; Reach SVHC Compliant: No; Lead Free: Lead Free; RoHS Compliant: Yes; ComponentLink1URL: https://datasheet.ciiva.com/22659/1719892-22659567.pdf?src-supplier=Element14; ComponentLink1Description: https://datasheet.ciiva.com/22659/1719892-22659567.pdf?src-supplier=Element14; ComponentLink2URL: https://datasheet.ciiva.com/1508/1828155-1508731.pdf?src-supplier=Element14; ComponentLink2Description: https://datasheet.ciiva.com/1508/1828155-1508731.pdf?src-supplier=Element14; ComponentLink3URL: https://datasheet.ciiva.com/15096/getdatasheetpartid-376613-15096286.pdf?src-supplier=Verical; ComponentLink3Description: https://datasheet.ciiva.com/15096/getdatasheetpartid-376613-15096286.pdf?src-supplier=Verical; ComponentLink4URL: https://datasheet.ciiva.com/1899/txs0102-1899401.pdf?src-supplier=Digi-Key; ComponentLink4Description: https://datasheet.ciiva.com/1899/txs0102-1899401.pdf?src-supplier=Digi-Key; ComponentLink5URL: https://datasheet.ciiva.com/1899/txs0102-1899402.pdf?src-supplier=Digi-Key; ComponentLink5Description: https://datasheet.ciiva.com/1899/txs0102-1899402.pdf?src-supplier=Digi-Key; ComponentLink6URL: https://datasheet.ciiva.com/1899/txs0102-1899403.pdf?src-supplier=Digi-Key; ComponentLink6Description: https://datasheet.ciiva.com/1899/txs0102-1899403.pdf?src-supplier=Digi-Key; ComponentLink7URL: https://datasheet.ciiva.com/14287/txs0102-14287925.pdf?src-supplier=Avnet; ComponentLink7Description: https://datasheet.ciiva.com/14287/txs0102-14287925.pdf?src-supplier=Avnet; ComponentLink8URL: https://datasheet.ciiva.com/48701/001073841-da-01-en-ic-volt-level-tr-txs0102yzpr-dsbga-8-tid-48701989.pdf?src-supplier=Conrad; ComponentLink8Description: https://datasheet.ciiva.com/48701/001073841-da-01-en-ic-volt-level-tr-txs0102yzpr-dsbga-8-tid-48701989.pdf?src-supplier=Conrad; LCSC Part Number: C353037; Item Type: IC
footprint 8-DSBGA
pins: A1 A2, A2 VCCA, B1 GND, B2, C1 B1, C2 VCCB, D1 OE, D2 A1

## TXS0108EPWR
designator U?
IC TRANSLATOR BIDIR 20TSSOP; Manufacturer: Texas Instruments; Manufacturer Part Number: TXS0108EPWR; Package: 20-TSSOP; LCSC Part Number: C17206; Item Type: IC; ComponentLink1Description: LCSC; ComponentLink1URL: https://www.lcsc.com/product-detail/Translators-Level-Shifters_Texas-Instruments-TXS0108EPWR_C17206.html
footprint TSSOP-20
pins: 1 A1, 2 VCCA, 3 A2, 4 A3, 5 A4, 6 A5, 7 A6, 8 A7, 9 A8, 10 OE, 11 GND, 12 B8, 13 B7, 14 B6, 15 B5, 16 B4, 17 B3, 18 B2, 19 V, 20 B1

## TXU0304PWR
designator U?
IC TRANSLATOR UNIDIR 14TSSOP; Manufacturer: Texas Instruments; Manufacturer Part Number: TXU0304PWR; Number of Bits: 4NUMBER; Supplier: Mouser; LCSC Part Number: C4364118; RoHS: No; Item Type: IC; Stock: 25859; Pricing: 1=0.85, 10=0.745, 50=0.745, 100=0.581, 1000=0.387, 10000=0.33 (USD); Case/Package: 71Case; Pins: 14NUMBER; Length: 5mm; Width: 4.4mm; Height: 1.2mm; Thickness: 1mm
footprint 14-TSSOP
pins: 1 VCCA, 2 A1, 3 A2, 4 A3, 5 A4Y, 6 NC, 7 GND, 8 OE, 9 NC, 10 B4, 11 B3Y, 12 B2Y, 13 B1Y, 14 VCCB

## UCC25630-1DDBR
designator U?
Half-Bridge Regulator Positive, Isolation Capable Output DC-DC Controller IC 14-SOIC; Manufacturer: Texas Instruments; Manufacturer Part Number: UCC25630-1DDBR; Number of Outputs: 1; Switching Frequency: 1MHz; Max Duty Cycle: 50%; Synchronous Rectifier: No; Supplier: Mouser; Supplier Part Number: 595-UCC25630-1DDBR; RoHS: Yes; Item Type: IC; Stock: 2241; Pricing: 1=3.78, 10=3.22, 50=3.22, 100=2.79, 1000=2, 10000=1.89 (USD); Case/Package: SOIC; Min Operating Temperature: -40°C; Max Operating Temperature: 125°C; Packaging: Cut Tape; Number of Output Phases: 1; Clock Sync: No; Series: -; RoHS Compliant: Yes; ComponentLink1URL: http://www.ti.com/lit/sg/slyt728/slyt728.pdf?src-supplier=Digikey; ComponentLink1Description: http://www.ti.com/lit/sg/slyt728/slyt728.pdf?src-supplier=Digikey; ComponentLink2URL: http://www.ti.com/general/docs/suppproductinfo.tsp?distId=10&amp;gotoUrl=http%3A%2F%2Fwww.ti.com%2Flit%2Fgpn%2Fucc256301&src-supplier=Digikey; ComponentLink2Description: http://www.ti.com/general/docs/suppproductinfo.tsp?distId=10&amp;gotoUrl=http%3A%2F%2Fwww.ti.com%2Flit%2Fgpn%2Fucc256301&src-supplier=Digikey
footprint UCC25630-1DDBR
pins: 1 HV, 3 VCC, 4 BLK, 5 FB, 6 ISNS, 7 VCR, 8 BW, 9 LL_SS, 10 LO, 11 GND, 12 RVCC, 14 HB, 15 HO, 16 HS

## UCC27517DBVR
designator U?
IC GATE DRVR LOW-SIDE SOT23-5; Manufacturer: Texas Instruments; Manufacturer Part Number: UCC27517DBVR; Operating Supply Voltage: 12V; Number of Outputs: 1; Max Supply Voltage: 18V; Min Supply Voltage: 4.5V; Rise Time: 22ns; Propagation Delay: 30ns; Output Current: 4A; Channel Type: Single; Fall Time: 11ns; Supplier: Mouser; LCSC Part Number: C99395; RoHS: Yes; Item Type: IC; Stock: 71094; Pricing: 1=0.77, 10=0.646, 50=0.646, 100=0.501, 1000=0.346, 10000=0.29 (USD); Mounting Technology: Surface Mount; Case/Package: SOT-23-5; Pins: 5; Min Operating Temperature: -40°C; Max Operating Temperature: 140°C; Packaging: Tape and Reel; Package Quantity: 3000; Max Output current: 4A; Number of Drivers: 1; Turn-On Delay Time: 30ns; Number of Channels: 1; Series: -; Length: 2.9mm; Width: 1.6mm; Height: 1.45mm; Thickness: 1.2mm; Radiation Hardening: No; Lead Free: Lead Free; RoHS Compliant: Yes; ComponentLink1URL: http://components.arrow.com/part/dataview/52526194S5756N7713?src-supplier=Arrow+Electronics; ComponentLink1Description: http://components.arrow.com/part/dataview/52526194S5756N7713?src-supplier=Arrow+Electronics; ComponentLink2URL: http://www.ti.com/lit/ds/symlink/ucc27517.pdf?src-supplier=Avnet; ComponentLink2Description: http://www.ti.com/lit/ds/symlink/ucc27517.pdf?src-supplier=Avnet; ComponentLink3URL: http://www.ti.com/lit/ds/symlink/ucc27517.pdf?src-supplier=Digikey; ComponentLink3Description: http://www.ti.com/lit/ds/symlink/ucc27517.pdf?src-supplier=Digikey; ComponentLink4URL: http://www.ti.com/lit/gpn/ucc27517?src-supplier=Mouser; ComponentLink4Description: http://www.ti.com/lit/gpn/ucc27517?src-supplier=Mouser; ComponentLink5URL: http://www.ti.com/general/docs/lit/getliterature.tsp?genericPartNumber=UCC27516&&fileType=pdf&src-supplier=Avnet; ComponentLink5Description: http://www.ti.com/general/docs/lit/getliterature.tsp?genericPartNumber=UCC27516&&fileType=pdf&src-supplier=Avnet; ComponentLink6URL: https://www.verical.com/server-webapp/html/getDatasheet?partID=482756&src-supplier=Verical; ComponentLink6Description: https://www.verical.com/server-webapp/html/getDatasheet?partID=482756&src-supplier=Verical
footprint SOT-23-5
pins: 1 VDD, 2 GND, 3 IN+, 4 IN-, 5 OUT

## UCC27524DGN
designator U?
IC GATE DRVR LOW-SIDE 8MSOP; Manufacturer: Texas Instruments; Manufacturer Part Number: UCC27524DGN; Supplier: Mouser; Supplier Part Number: 595-UCC27524DGN; RoHS: Yes; Item Type: IC; Stock: 6831; Pricing: 1=2.55, 10=1.85, 50=1.85, 100=1.41, 1000=1.25, 10000=1.05 (USD); ComponentLink1URL: https://datasheet.ciiva.com/15110/getdatasheetpartid-551635-15110694.pdf?src-supplier=Verical; ComponentLink1Description: https://datasheet.ciiva.com/15110/getdatasheetpartid-551635-15110694.pdf?src-supplier=Verical; ComponentLink2URL: https://datasheet.ciiva.com/7977/1806027-7977576.pdf?src-supplier=Element14; ComponentLink2Description: https://datasheet.ciiva.com/7977/1806027-7977576.pdf?src-supplier=Element14; ComponentLink3URL: https://datasheet.ciiva.com/6614/ucc27524-6614166.pdf?src-supplier=Digikey; ComponentLink3Description: https://datasheet.ciiva.com/6614/ucc27524-6614166.pdf?src-supplier=Digikey; ComponentLink4URL: https://datasheet.ciiva.com/14266/ucc27523-14266646.pdf?src-supplier=Avnet; ComponentLink4Description: https://datasheet.ciiva.com/14266/ucc27523-14266646.pdf?src-supplier=Avnet
footprint 8-HVSSOP
pins: 1 ENA, 2 INA, 3 GND, 4 INB, 5 OUTB, 6 VDD, 7 OUTA, 8 ENB, 9 EP

## UCS7604
designator U?
RGBW LED Driver; Manufacturer: UCS; Manufacturer Part Number: UCS7604; Item Type: IC; Package: SOP-10; LCSC Part Number: -; ComponentLink1Description: UCS; ComponentLink1URL: https://suntechlite.com/ucs7604-specification-sheet-download/
footprint SOP-10
pins: 1 R, 2 G, 3 B, 4 W, 5 GND, 6 FDIN, 7 REXT, 8 DIN, 9 VDD, 10 DOUT

## ULN2003AIDR
designator U?
IC PWR RELAY 7NPN 1:1 16SOIC; Manufacturer: Texas Instruments; Manufacturer Part Number: ULN2003AIDR; Supplier: Mouser; Supplier Part Number: 595-ULN2003AIDR; RoHS: Yes; Item Type: IC; Stock: 2012; Pricing: 1=0.66, 10=0.589, 50=0.589, 100=0.402, 1000=0.285, 10000=0.232 (USD); ComponentLink1URL: https://datasheet.ciiva.com/15139/getdatasheetpartid-47948-15139878.pdf?src-supplier=Verical; ComponentLink1Description: https://datasheet.ciiva.com/15139/getdatasheetpartid-47948-15139878.pdf?src-supplier=Verical; ComponentLink2URL: https://datasheet.ciiva.com/14424/ulq2003a-14424030.pdf?src-supplier=Avnet; ComponentLink2Description: https://datasheet.ciiva.com/14424/ulq2003a-14424030.pdf?src-supplier=Avnet; ComponentLink3URL: https://datasheet.ciiva.com/1700/uln2003ai-1700820.pdf?src-supplier=Digikey; ComponentLink3Description: https://datasheet.ciiva.com/1700/uln2003ai-1700820.pdf?src-supplier=Digikey; ComponentLink4URL: https://datasheet.ciiva.com/1700/uln2003ai-1700821.pdf?src-supplier=Digikey; ComponentLink4Description: https://datasheet.ciiva.com/1700/uln2003ai-1700821.pdf?src-supplier=Digikey; ComponentLink5URL: https://datasheet.ciiva.com/1700/uln2003ai-1700822.pdf?src-supplier=Digikey; ComponentLink5Description: https://datasheet.ciiva.com/1700/uln2003ai-1700822.pdf?src-supplier=Digikey
footprint 16-SOIC (0.154", 3.90mm Width)
pins: 1 1B, 2 2B, 3 3B, 4 4B, 5 5B, 6 6B, 7 7B, 8 E, 9 COM, 10 7C, 11 6C, 12 5C, 13 4C, 14 3C, 15 2C, 16 1C

## UM803RS
designator U?
3-Pin uP Reset Circuits with Ope; Manufacturer: Union Semiconductor; Manufacturer Part Number: UM803RS; Item Type: IC; Supplier: Arrow Electronics; Supplier Part Number: UM803RS; RoHS: No; Stock: 2840; Pricing: 1=0.1121 (USD); LCSC Part Number: C620009
footprint SOT-23 (TRANS NPN 40V 0.6A SOT23)
pins: 1 GND, 2 ~{RESET}, 3 VCC

## UM805RE
designator U?
Open Drain Output uP Reset with; Manufacturer: Union Semiconductor; Manufacturer Part Number: UM805RE; Item Type: IC; Package: SOT-143; LCSC Part Number: C620010; ComponentLink1Description: LCSC; ComponentLink1URL: https://www.lcsc.com/product-detail/Monitors-Reset-Circuits_Union-Semiconductor-UM805RE_C620010.html
footprint SOT-143-4_
pins: 1 GND, 2 ~{RESET}, 3 ~{MR}, 4 VCC

## UM1750S-00
designator U?
Linear Voltage Regulator IC Positive Adjustable 1 Output 350mA SOT-23-5; Manufacturer: Union Semiconductor; Manufacturer Part Number: UM1750S-00; Item Type: LDO; Package: SOT-23-5; LCSC Part Number: C620011; ComponentLink1Description: LCSC; ComponentLink1URL: https://jlcpcb.com/partdetail/UnionSemiconductor-UM1750S00/C620011
footprint SOT-23-5
pins: 1 IN, 2 GND, 3 SHDN#, 4 FB, 5 OUT

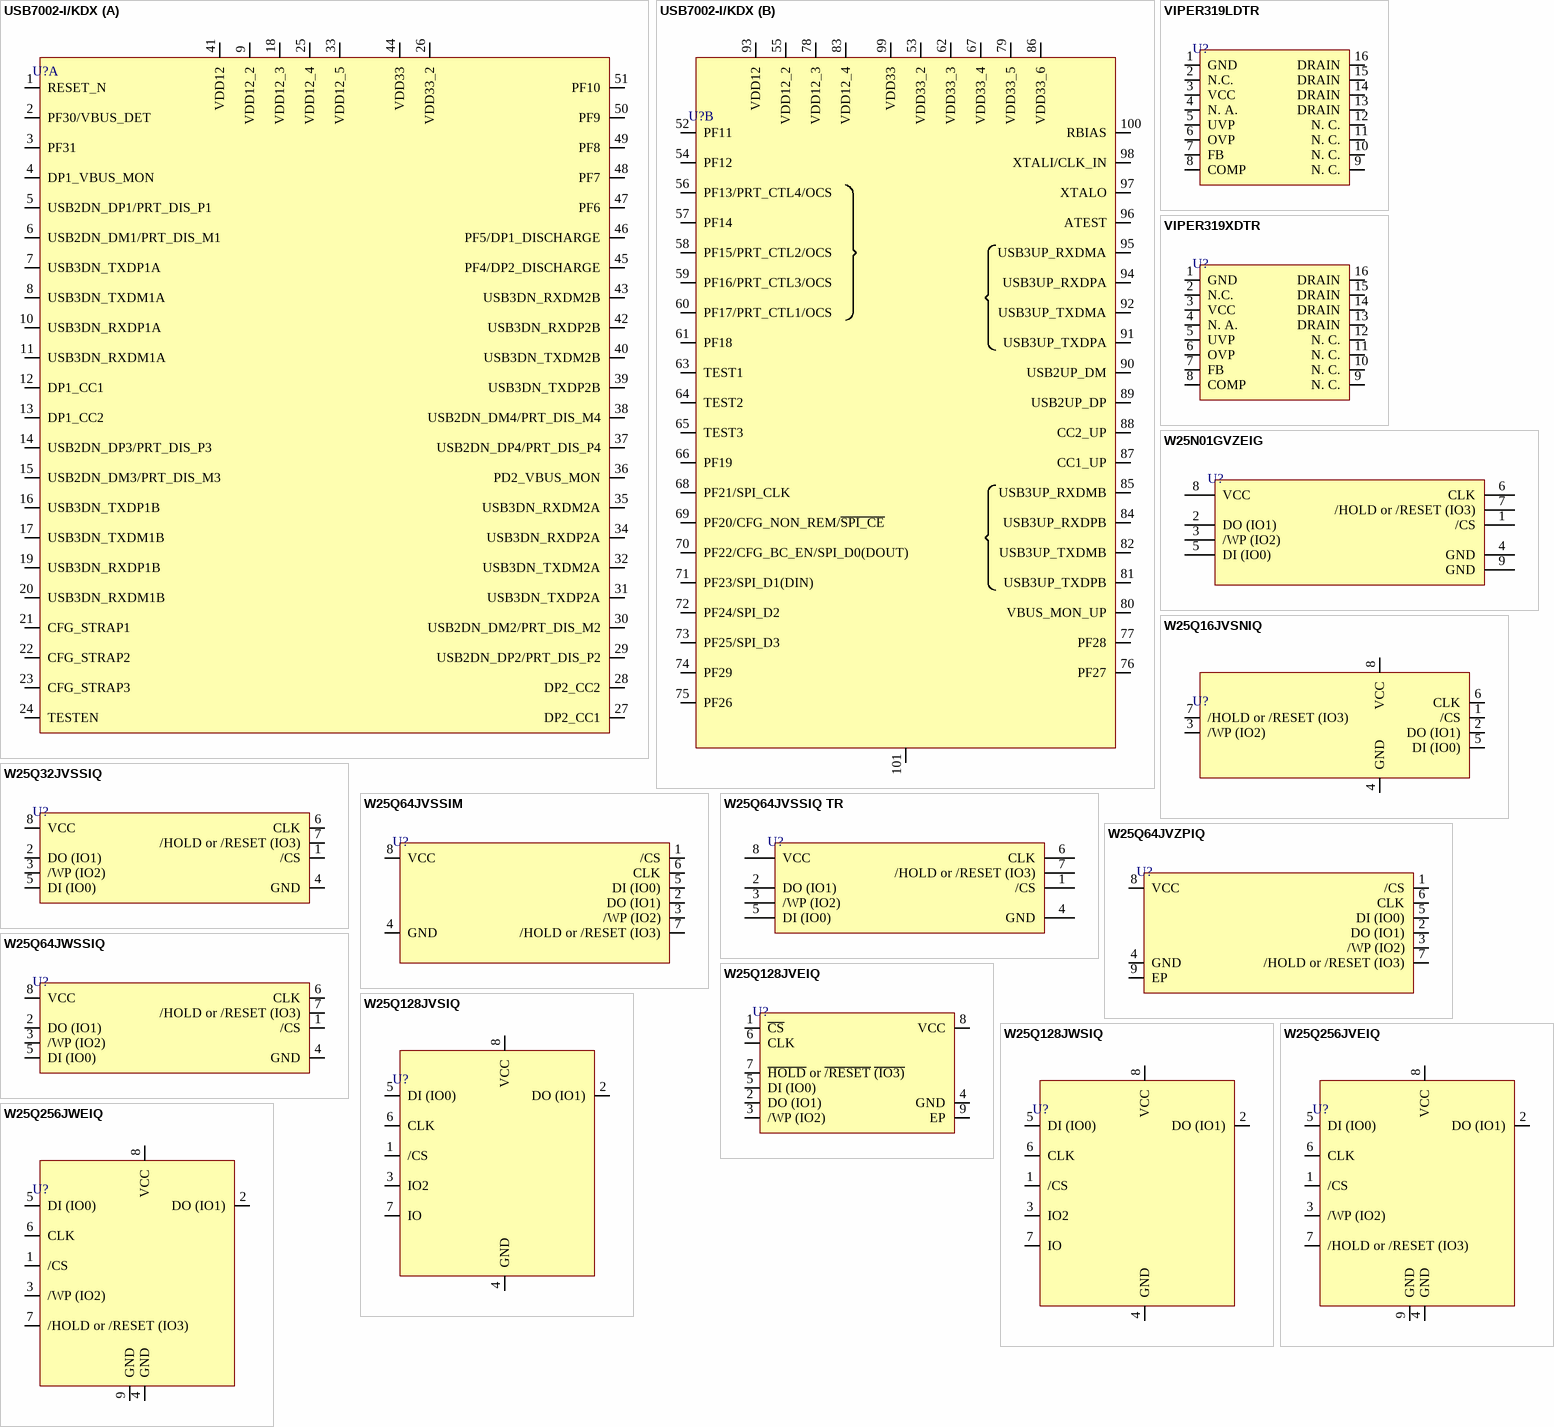
[diagram p22: symbols USB7002-I/KDX to W25Q256JWEIQ]

## USB7002-I/KDX
designator U?
IC USB HUB CNTRLR 100VQFN; Manufacturer: Microchip; Manufacturer Part Number: USB7002-I/KDX; Supplier: Digikey; Supplier Part Number: USB7002-I/KDX-ND; RoHS: Yes; Item Type: IC; Stock: 148; Pricing: 1=10.9, 25=9.09, 100=8.775 (USD); Case/Package: VQFN; Interface: USB; Packaging: Tray; Series: Automotive, AEC-Q100; RoHS Compliant: Yes; ComponentLink1URL: http://ww1.microchip.com/downloads/en/devicedoc/00002445a.pdf?src-supplier=Digikey; ComponentLink1Description: http://ww1.microchip.com/downloads/en/devicedoc/00002445a.pdf?src-supplier=Digikey
footprint 100-VQFN (12x12)
part A pins: 1 RESET_N, 2 PF30/VBUS_DET, 3 PF31, 4 DP1_VBUS_MON, 5 USB2DN_DP1/PRT_DIS_P1, 6 USB2DN_DM1/PRT_DIS_M1, 7 USB3DN_TXDP1A, 8 USB3DN_TXDM1A, 9 VDD12_2, 10 USB3DN_RXDP1A, 11 USB3DN_RXDM1A, 12 DP1_CC1, 13 DP1_CC2, 14 USB2DN_DP3/PRT_DIS_P3, 15 USB2DN_DM3/PRT_DIS_M3, 16 USB3DN_TXDP1B, 17 USB3DN_TXDM1B, 18 VDD12_3, 19 USB3DN_RXDP1B, 20 USB3DN_RXDM1B, 21 CFG_STRAP1, 22 CFG_STRAP2, 23 CFG_STRAP3, 24 TESTEN, 25 VDD12_4, 26 VDD33_2, 27 DP2_CC1, 28 DP2_CC2, 29 USB2DN_DP2/PRT_DIS_P2, 30 USB2DN_DM2/PRT_DIS_M2, 31 USB3DN_TXDP2A, 32 USB3DN_TXDM2A, 33 VDD12_5, 34 USB3DN_RXDP2A, 35 USB3DN_RXDM2A, 36 PD2_VBUS_MON, 37 USB2DN_DP4/PRT_DIS_P4, 38 USB2DN_DM4/PRT_DIS_M4, 39 USB3DN_TXDP2B, 40 USB3DN_TXDM2B, 41 VDD12, 42 USB3DN_RXDP2B, 43 USB3DN_RXDM2B, 44 VDD33, 45 PF4/DP2_DISCHARGE, 46 PF5/DP1_DISCHARGE, 47 PF6, 48 PF7, 49 PF8, 50 PF9, 51 PF10
part B pins: 52 PF11, 53 VDD33_2, 54 PF12, 55 VDD12_2, 56 PF13/PRT_CTL4/OCS, 57 PF14, 58 PF15/PRT_CTL2/OCS, 59 PF16/PRT_CTL3/OCS, 60 PF17/PRT_CTL1/OCS, 61 PF18, 62 VDD33_3, 63 TEST1, 64 TEST2, 65 TEST3, 66 PF19, 67 VDD33_4, 68 PF21/SPI_CLK, 69 PF20/CFG_NON_REM/~{SPI_CE}, 70 PF22/CFG_BC_EN/SPI_D0(DOUT), 71 PF23/SPI_D1(DIN), 72 PF24/SPI_D2, 73 PF25/SPI_D3, 74 PF29, 75 PF26, 76 PF27, 77 PF28, 78 VDD12_3, 79 VDD33_5, 80 VBUS_MON_UP, 81 USB3UP_TXDPB, 82 USB3UP_TXDMB, 83 VDD12_4, 84 USB3UP_RXDPB, 85 USB3UP_RXDMB, 86 VDD33_6, 87 CC1_UP, 88 CC2_UP, 89 USB2UP_DP, 90 USB2UP_DM, 91 USB3UP_TXDPA, 92 USB3UP_TXDMA, 93 VDD12, 94 USB3UP_RXDPA, 95 USB3UP_RXDMA, 96 ATEST, 97 XTALO, 98 XTALI/CLK_IN, 99 VDD33, 100 RBIAS, 101 VSS

## VIPER319LDTR
designator U?
AC to DC Switching Converter Boost/Buck/Flyback 4.25V 145kHz T/R 16-Pin SO N; Manufacturer: STMicroelectronics; Manufacturer Part Number: VIPER319LDTR; Item Type: IC; LCSC Part Number: C3094036; Supplier: Digi-Key; Supplier Part Number: 497-VIPER319LDCT-ND; RoHS: No; Category: Voltage Regulators - Switching; Pricing: 1=1.65, 10=1.471, 25=1.3964, 100=1.1471, 250=1.07228, 500=0.9476, 1000=0.74811 (USD)
footprint SOP-16
pins: 1 GND, 2 N.C., 3 VCC, 4 N. A., 5 UVP, 6 OVP, 7 FB, 8 COMP, 9 N. C., 10 N. C., 11 N. C., 12 N. C., 13 DRAIN, 14 DRAIN, 15 DRAIN, 16 DRAIN

## VIPER319XDTR
designator U?
IC OFFLINE SWITCH MULT TOP 16SO; Manufacturer: STMicroelectronics; Manufacturer Part Number: VIPER319XDTR; Supplier: Mouser; Supplier Part Number: 511-VIPER319XDTR; RoHS: Yes; Category: Voltage Regulators - Switching; Stock: 1952; Pricing: 1=1.73, 10=1.55, 50=1.47, 100=1.21, 1000=0.786, 10000=0.696 (USD); Item Type: IC
footprint SOP-16
pins: 1 GND, 2 N.C., 3 VCC, 4 N. A., 5 UVP, 6 OVP, 7 FB, 8 COMP, 9 N. C., 10 N. C., 11 N. C., 12 N. C., 13 DRAIN, 14 DRAIN, 15 DRAIN, 16 DRAIN

## W25N01GVZEIG
designator U?
IC FLASH 1GBIT SPI/QUAD 8WSON; Manufacturer: Winbond; Manufacturer Part Number: W25N01GVZEIG; Interface: SPI,Serial; Memory Type: NAND; Density: 1Gb; Max Supply Voltage: 3.6V; Min Supply Voltage: 2.7V; Operating Supply Voltage: 3.3V; Page Size: 2Kb; Access Time: 7ns; Supplier 1: Arrow Electronics; RoHS: Yes; Category: Flash; Stock 1: 128; Pricing 1: 1=3.40000, 10=3.05600, 25=2.92700, 100=2.67700, 252=2.58500, 504=2.46500, 1008=2.40800, 2520=2.26600, 5040=2.24300 (USD); Mount: Surface Mount; Number of Pins: 8; Min Operating Temperature: -40°C; Max Operating Temperature: 85°C; RoHS Compliant: Yes; Lead Free: Lead Free; Supplier Part Number 1: W25N01GVZEIG; LCSC Part Number: C907680; Item Type: IC; ComponentLink1Description: LCSC; ComponentLink1URL: https://www.lcsc.com/product-detail/NAND-FLASH_Winbond-Elec-W25N01GVZEIG_C907680.html
footprint 8-WSON (8x6)
pins: 1 /CS, 2 DO (IO1), 3 /WP (IO2), 4 GND, 5 DI (IO0), 6 CLK, 7 /HOLD or /RESET (IO3), 8 VCC, 9 GND

## W25Q16JVSNIQ
designator U?
IC FLASH 16MBIT SPI/QUAD 8SOIC; Manufacturer: Winbond; Manufacturer Part Number: W25Q16JVSNIQ; Memory Format: Non-Volatile,FLASH,NOR; Memory Size: 16Mb; Frequency: 133MHz; Interface: SPI,Serial; Page Size: 256B; Min Supply Voltage: 2.7V; Max Supply Voltage: 3.6V; Access Time-Max: 6ns; Supplier: Digi-Key; Supplier Part Number: W25Q16JVSNIQ-ND; RoHS: Yes; Category: Flash; Stock: 181191; Pricing: 1=0.5, 25=0.4528, 100=0.3969, 500=0.38024, 2500=0.34104 (USD); Mounting Technology: Surface Mount; Case/Package: SOIC; Pins: 8; Min Operating Temperature: -40°C; Max Operating Temperature: 85°C; Packaging: Rail/Tube; Series: SpiFlash®; RoHS Compliant: Yes; ComponentLink1URL: https://datasheet.ciiva.com/56373/w25q16jvspirevg03222018plus-56373878.pdf?src-supplier=Digi-Key; ComponentLink1Description: https://datasheet.ciiva.com/56373/w25q16jvspirevg03222018plus-56373878.pdf?src-supplier=Digi-Key; LCSC Part Number: C2456211; Item Type: IC
footprint SOP-8
pins: 1 /CS, 2 DO (IO1), 3 /WP (IO2), 4 GND, 5 DI (IO0), 6 CLK, 7 /HOLD or /RESET (IO3), 8 VCC

## W25Q32JVSSIQ
designator U?
IC FLASH 32MBIT 133MHZ 8SOP; Manufacturer: Winbond; Manufacturer Part Number: W25Q32JVSSIQ; Memory Format: Non-Volatile,FLASH,NOR; Interface: SPI,Serial; Memory Size: 32Mb; Operating Supply Voltage: 3V; Page Size: 256B; Supplier: Arrow Electronics; Supplier Part Number: W25Q32JVSSIQ; RoHS: Yes; Category: Flash; Stock: 8474; Pricing: 1=0.6837, 25=0.5896, 100=0.5874, 500=0.5233, 5000=0.5007 (USD); Mounting Technology: Surface Mount; Case/Package: SOIC; Pins: 8; Min Operating Temperature: -40°C; Max Operating Temperature: 85°C; Packaging: Rail/Tube; Frequency: 133MHz; Series: SpiFlash®; Density: 32Mb; RoHS Compliant: Yes; ComponentLink1URL: http://www.winbond.com/resource-files/w25q32jv%20revg%2003272018%20plus.pdf?src-supplier=Digi-Key; ComponentLink1Description: http://www.winbond.com/resource-files/w25q32jv%20revg%2003272018%20plus.pdf?src-supplier=Digi-Key; ComponentLink2URL: https://www.winbond.com/hq/product/code-storage-flash-memory/serial-nor-flash/?__locale=en&partNo=W25Q32JV&src-supplier=Avnet; ComponentLink2Description: https://www.winbond.com/hq/product/code-storage-flash-memory/serial-nor-flash/?__locale=en&partNo=W25Q32JV&src-supplier=Avnet; LCSC Part Number: C82344; Item Type: IC
footprint SOIC-8 (208 mil)
pins: 1 /CS, 2 DO (IO1), 3 /WP (IO2), 4 GND, 5 DI (IO0), 6 CLK, 7 /HOLD or /RESET (IO3), 8 VCC

## W25Q64JVSSIM
designator U?
IC FLASH 64MBIT SPI/QUAD 8SOIC; Manufacturer: Winbond; Manufacturer Part Number: W25Q64JVSSIM; Memory Format: Non-Volatile,FLASH; Memory Size: 64Mb; Frequency: 133MHz; Supplier: Rs; Supplier Part Number: 1882666P; RoHS: Yes; Category: Flash; Stock: 300; Pricing: 20=0.818, 50=0.796, 100=0.776, 250=0.756 (GBP); Mounting Technology: Surface Mount; Case/Package: SOIC; Min Operating Temperature: -40°C; Max Operating Temperature: 85°C; Packaging: Rail/Tube; Series: SpiFlash®; RoHS Compliant: Yes; ComponentLink1URL: http://www.winbond.com/resource-files/w25q64jv%20revj%2003272018%20plus.pdf?src-supplier=Digi-Key; ComponentLink1Description: http://www.winbond.com/resource-files/w25q64jv%20revj%2003272018%20plus.pdf?src-supplier=Digi-Key; LCSC Part Number: C5362615; Item Type: IC
footprint SOIC-8 (208 mil)
pins: 1 /CS, 2 DO (IO1), 3 /WP (IO2), 4 GND, 5 DI (IO0), 6 CLK, 7 /HOLD or /RESET (IO3), 8 VCC

## W25Q64JVSSIQ TR
designator U?
IC FLASH 64M SPI 133MHZ 8SOIC; Manufacturer: Winbond; Manufacturer Part Number: W25Q64JVSSIQ TR; Memory Format: FLASH,NOR; Interface: SPI,Serial; Supplier 1: Arrow Electronics; RoHS: Yes; Category: Memory; Stock 1: 56000; Pricing 1: 2000=0.8199, 4000=0.7715, 6000=0.7637, 10000=0.7635 (USD); Case/Package: SOIC; Min Operating Temperature: -40°C; Max Operating Temperature: 85°C; Packaging: Tape and Reel; Series: SpiFlash®; ComponentLink1URL: http://www.winbond.com/resource-files/w25q64jv%20spi%20%20%20revc%2006032016%20kms.pdf?src-supplier=Digi-Key; ComponentLink1Description: http://www.winbond.com/resource-files/w25q64jv%20spi%20%20%20revc%2006032016%20kms.pdf?src-supplier=Digi-Key; ComponentLink2URL: http://www.winbond.com/resource-files/w25q64jv%20revj%2003272018%20plus.pdf?src-supplier=Digi-Key; ComponentLink2Description: http://www.winbond.com/resource-files/w25q64jv%20revj%2003272018%20plus.pdf?src-supplier=Digi-Key; Supplier Part Number 1: W25Q64JVSSIQ TR; LCSC Part Number: C179171; Item Type: IC
footprint SOIC-8 (208 mil)
pins: 1 /CS, 2 DO (IO1), 3 /WP (IO2), 4 GND, 5 DI (IO0), 6 CLK, 7 /HOLD or /RESET (IO3), 8 VCC

## W25Q64JVZPIQ
designator U?
IC FLASH 64MBIT SPI/QUAD 8WSON; Manufacturer: Winbond; Manufacturer Part Number: W25Q64JVZPIQ; Supplier: Digi-Key; Supplier Part Number: 256-W25Q64JVZPIQ-ND; RoHS: Yes; Category: Flash; Stock: 13550; Pricing: 1=1.08, 10=0.98, 25=0.9676, 40=0.96175, 100=0.86, 300=0.85277, 500=0.84016, 1000=0.8101, 4900=0.73787 (USD); RoHS Compliant: Yes; ComponentLink1Description: LCSC; ComponentLink1URL: https://www.lcsc.com/product-detail/NOR-FLASH_Winbond-Elec-W25Q64JVZPIQ_C2940197.html; LCSC Part Number: C2940197; Item type: IC
footprint 8-WSON 6x5-mm
pins: 1 /CS, 2 DO (IO1), 3 /WP (IO2), 4 GND, 5 DI (IO0), 6 CLK, 7 /HOLD or /RESET (IO3), 8 VCC, 9 EP

## W25Q64JWSSIQ
designator U?
IC FLASH 64MBIT SPI/QUAD 8SOIC; Manufacturer: Winbond; Manufacturer Part Number: W25Q64JWSSIQ; Memory Size: 64Mb; Frequency: 133MHz; Supplier: Digikey; LCSC Part Number: C2985658; RoHS: Yes; Item Type: IC; Stock: 2071; Pricing: 1=1.65, 10=1.165, 25=1.0436, 90=0.91822, 180=0.86694, 270=0.8413, 540=0.80363, 1080=0.77263, 5040=0.72195 (USD); Mounting Technology: Surface Mount; Case/Package: SOIC; Min Operating Temperature: -40°C; Max Operating Temperature: 85°C; Memory Format: FLASH; Series: SpiFlash®
footprint SOIC-8 (208 mil)
pins: 1 /CS, 2 DO (IO1), 3 /WP (IO2), 4 GND, 5 DI (IO0), 6 CLK, 7 /HOLD or /RESET (IO3), 8 VCC

## W25Q128JVEIQ
designator U?
IC FLASH 128MBIT SPI/QUAD 8WSON; Manufacturer: Winbond; Manufacturer Part Number: W25Q128JVEIQ; Memory Format: Non-Volatile,FLASH; Memory Size: 128Mb; Frequency: 133MHz; Supplier: Digikey; LCSC Part Number: C401662; RoHS: Yes; Item Type: IC; Stock: 12733; Pricing: 1=1.92, 10=1.701, 25=1.6224, 63=1.54651, 126=1.49183, 252=1.43909, 504=1.38821, 1008=1.33908, 5040=1.23141 (USD); Mounting Technology: Surface Mount; Min Operating Temperature: -40°C; Max Operating Temperature: 85°C; Packaging: Rail/Tube; Series: SpiFlash®; RoHS Compliant: Yes; ComponentLink1URL: http://www.winbond.com/resource-files/w25q128jv%20revf%2003272018%20plus.pdf?src-supplier=Digikey; ComponentLink1Description: http://www.winbond.com/resource-files/w25q128jv%20revf%2003272018%20plus.pdf?src-supplier=Digikey
footprint WSON-8-EP(6x8)
pins: 1 ~{CS}, 2 DO (IO1), 3 /WP (IO2), 4 GND, 5 DI (IO0), 6 CLK, 7 ~{HOLD} or ~{/RESET} ~{(IO3)}, 8 VCC, 9 EP